# Altium integrated library Resistor.IntLib: 126 symbols (part 2 of 2)
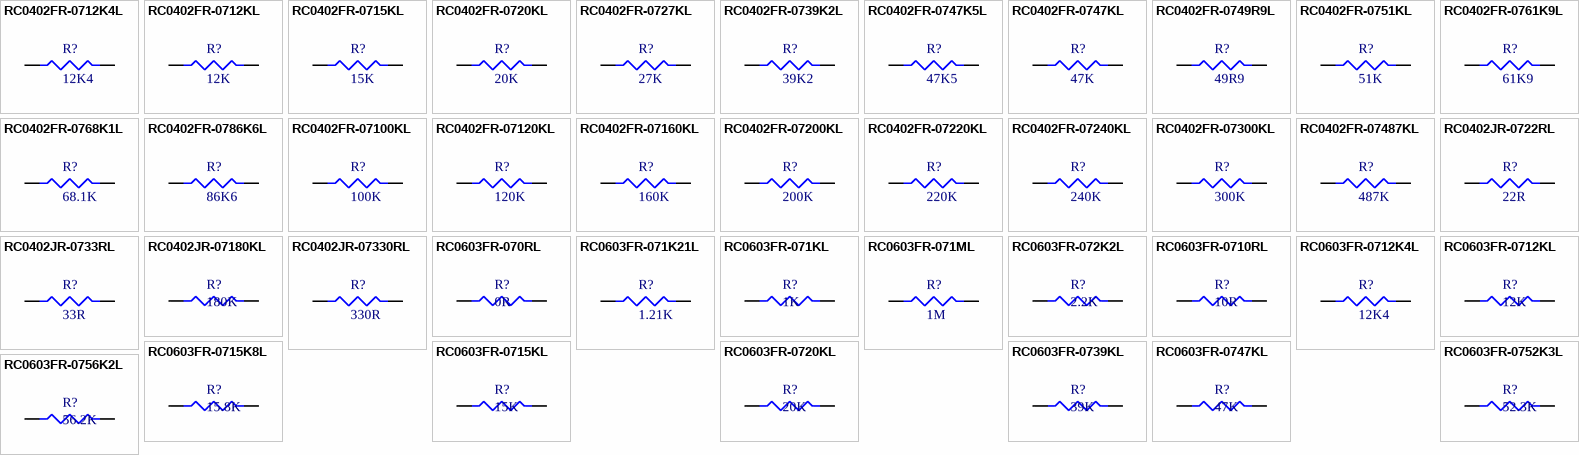
[diagram p4: symbols RC0402FR-0712K4L to RC0603FR-0756K2L]

## RC0603FR-0712K4L
designator R?, comment 12K4
12.4K, %1, 1/10W, 0603; Manufacturer: YAGEO; Manufacturer Part Number: RC0603FR-0712K4L; Value: 12400; Tolerance: 1%; Power Rating: 100mW; Voltage Rating: 50V; Temperature Coefficient: 100ppm/°C; Working Voltage: 75V; Purpose Of Usage: BASIC; Supplier 1: Digi-Key; RoHS: YES; Category: RESISTOR; Case/Package: 0603; Case Code (Imperial): 0603; Min Operating Temperature: -55°C; Max Operating Temperature: 155°C; Max Power Dissipation: 100mW; Voltage Rating (DC): 50V; Supplier Part Number 1: 311-12.4KHRTR-ND; Mount: SMD; Price 10K: 0.0025; Stock ID: ??; Sub-Category: CHIP RESISTOR; Local Supplier: GENERAL
footprint R0603 (Chip Resistor, 2-Leads, Body 1.60x0.80mm, IPC Medium Density)
pins: 1, 2

## RC0603FR-0712KL
designator R?, comment 12K
12K, %1, 1/10W, 0603; Manufacturer: YAGEO; Manufacturer Part Number: RC0603FR-0712KL; Value: 12000; Tolerance: 1%; Power Rating: 100mW; Voltage Rating (DC): 50V; Temperature Coefficient: 100ppm/°C; Purpose Of Usage: BASIC; Supplier 1: Digi-Key; Supplier Part Number 1: 311-12.0KHRCT-ND; RoHS: YES; Case/Package: 0603; Case Code (Imperial): 0603; Min Operating Temperature: -55°C; Max Operating Temperature: 155°C; Voltage Rating: 50V; Max Power Dissipation: 100mW; Category: RESISTOR; Sub-Category: CHIP RESISTOR; Stock ID: ??; Mount: SMD; Price 10K: 0.0025; Local Supplier: GENERAL
footprint R0603
pins: 1, 2

## RC0603FR-0715K8L
designator R?, comment 15.8K
15.8K ,%1 ,1/10 W ,0603; Manufacturer: YAGEO; Manufacturer Part Number: RC0603FR-0715K8L; Value: 15800; Tolerance: 1%; Voltage Rating (DC): 50V; Temperature Coefficient: 100ppm/°C; Power Rating: 100mW; Purpose Of Usage: BASIC; Supplier 1: Digi-Key; Supplier Part Number 1: 311-15.8KHRTR-ND; RoHS: YES; Case/Package: 0603; Case Code (Imperial): 0603; Min Operating Temperature: -55°C; Max Operating Temperature: 155°C; Voltage Rating: 50V; Category: RESISTOR; Supplier 2: JLCPCB; Sub-Category: CHIP RESISTOR; Stock ID: ??; Mount: SMD; Max Power Dissipation: 100mW; Price 10K: 0.0025; Local Supplier: GENERAL
footprint R0603
pins: 1, 2

## RC0603FR-0715KL
designator R?, comment 15K
15K, 1%, 1/10W, 0603; Manufacturer: YAGEO; Manufacturer Part Number: RC0603FR-0715KL; Value: 15000; Temperature Coefficient: 100ppm/°C; Voltage Rating (DC): 50V; Power Rating: 100mW; Purpose Of Usage: BASIC; Supplier 1: Digi-Key; Supplier Part Number 1: 311-15.0KHRDKR-ND; RoHS: YES; Case/Package: 0603; Case Code (Imperial): 0603; Min Operating Temperature: -55°C; Max Operating Temperature: 155°C; Tolerance: 1%; Voltage Rating: 50V; Max Power Dissipation: 100mW; Category: RESISTOR; Sub-Category: CHIP RESISTOR; Stock ID: ??; Mount: SMD; Price 10K: 0.0025; Local Supplier: GENERAL
footprint R0603
pins: 1, 2

## RC0603FR-0720KL
designator R?, comment 20K
20K, %1, 1/10W, 0603; Manufacturer: YAGEO; Manufacturer Part Number: RC0603FR-0720KL; Value: 20000; Tolerance: 1%; Temperature Coefficient: 100ppm/°C; Voltage Rating (DC): 50V; Power Rating: 100mW; Purpose Of Usage: BASIC; Supplier 1: Digi-Key; Supplier Part Number 1: 311-20.0KHRCT-ND; RoHS: YES; Case/Package: 0603; Case Code (Imperial): 0603; Min Operating Temperature: -55°C; Max Operating Temperature: 155°C; Voltage Rating: 50V; Max Power Dissipation: 100mW; Category: RESISTOR; Sub-Category: CHIP RESISTOR; Stock ID: ??; Mount: SMD; Price 10K: 0.0025; Local Supplier: GENERAL
footprint R0603
pins: 1, 2

## RC0603FR-0739KL
designator R?, comment 39K
39K, %1, 1/10W, 0603; Manufacturer: YAGEO; Manufacturer Part Number: RC0603FR-0739KL; Tolerance: 1%; Value: 39000; Power Rating: 100mW; Voltage Rating: 50V; Temperature Coefficient: 100ppm/°C; Purpose Of Usage: BASIC; Supplier 1: Digi-Key; Supplier Part Number 1: 311-39.0KHRCT-ND; RoHS: YES; Case/Package: 0603; Case Code (Imperial): 0603; Min Operating Temperature: -55°C; Max Operating Temperature: 155°C; Voltage Rating (DC): 50V; Category: RESISTOR; Sub-Category: CHIP RESISTOR; Stock ID: ??; Mount: SMD; Max Power Dissipation: 100mW; Price 10K: 0.0025; Local Supplier: GENERAL
footprint R0603
pins: 1, 2

## RC0603FR-0747KL
designator R?, comment 47K
47K, %1, 1/10W, 0603; Manufacturer: YAGEO; Manufacturer Part Number: RC0603FR-0747KL; Tolerance: 1%; Voltage Rating (DC): 50V; Value: 47000; Temperature Coefficient: 100ppm/°C; Power Rating: 100mW; Purpose Of Usage: BASIC; Supplier 1: Digi-Key; Supplier Part Number 1: 311-47.0KHRCT-ND; RoHS: YES; Case/Package: 0603; Case Code (Imperial): 0603; Min Operating Temperature: -55°C; Max Operating Temperature: 155°C; Voltage Rating: 50V; Max Power Dissipation: 100mW; Category: RESISTOR; Supplier 2: JLCPCB; Supplier Part Number 2: C25819; Sub-Category: CHIP RESISTOR; Stock ID: ??; Mount: SMD; Price 10K: 0.0025; Local Supplier: GENERAL
footprint R0603
pins: 1, 2

## RC0603FR-0752K3L
designator R?, comment 52.3K
52.3K ,%1 ,1/10 W ,0603; Manufacturer: YAGEO; Manufacturer Part Number: RC0603FR-0752K3L; Value: 52300; Power Rating: 100mW; Tolerance: 1%; Voltage Rating: 50V; Temperature Coefficient: 25ppm/°C; Working Voltage: 75V; Purpose Of Usage: BASIC; Supplier 1: Digi-Key; RoHS: YES; Case/Package: 0603; Case Code (Imperial): 0603; Min Operating Temperature: -55°C; Max Operating Temperature: 155°C; Max Power Dissipation: 100mW; Voltage Rating (DC): 50V; Category: RESISTOR; Supplier 2: JLCPCB; Supplier Part Number 2: C21189; Sub-Category: CHIP RESISTOR; Stock ID: ??; Mount: SMD; Price 10K: 0.0025; Local Supplier: GENERAL; Supplier Part Number 1: 311-52.3KHRTR-ND
footprint R0603
pins: 1, 2

## RC0603FR-0756K2L
designator R?, comment 56.2K
56.2 ,%1 ,1/10 W ,0603; Manufacturer: YAGEO; Manufacturer Part Number: RC0603FR-0756K2L; Value: 56200; Power Rating: 100mW; Tolerance: 1%; Voltage Rating: 50V; Temperature Coefficient: 200ppm/°C; Working Voltage: 75V; Purpose Of Usage: BASIC; Supplier 1: Digi-Key; Supplier Part Number 1: 311-56.2KHRTR-ND; RoHS: YES; Case/Package: 0603; Case Code (Imperial): 0603; Min Operating Temperature: -55°C; Max Operating Temperature: 155°C; Max Power Dissipation: 100mW; Voltage Rating (DC): 50V; Category: RESISTOR; Sub-Category: CHIP RESISTOR; Stock ID: ??; Mount: SMD; Price 10K: 0.0025; Local Supplier: GENERAL
footprint R0603
pins: 1, 2

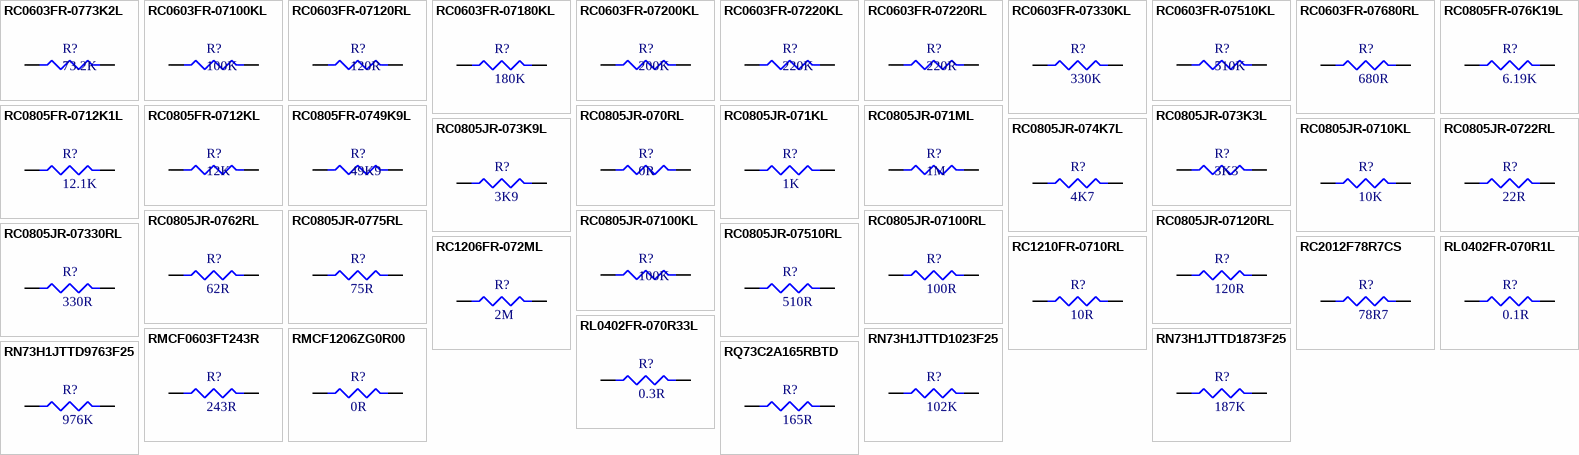
[diagram p2: symbols RC0603FR-0773K2L to RQ73C2A165RBTD]

## RC0603FR-0773K2L
designator R?, comment 73.2K
73.2K ,%1 ,1/10 W ,0603; Manufacturer: YAGEO; Manufacturer Part Number: RC0603FR-0773K2L; Value: 73200; Power Rating: 100mW; Tolerance: 1%; Voltage Rating: 50V; Temperature Coefficient: 200ppm/°C; Working Voltage: 75V; Purpose Of Usage: BASIC; Supplier 1: Digi-Key; Supplier Part Number 1: 311-73.2KHRTR-ND; RoHS: YES; Case/Package: 0603; Case Code (Imperial): 0603; Min Operating Temperature: -55°C; Max Operating Temperature: 155°C; Max Power Dissipation: 100mW; Voltage Rating (DC): 50V; Category: RESISTOR; Sub-Category: CHIP RESISTOR; Stock ID: ??; Mount: SMD; Price 10K: 0.0025; Local Supplier: GENERAL
footprint R0603
pins: 1, 2

## RC0603FR-07100KL
designator R?, comment 100K
100K, %1, 1/10W, 0603; Manufacturer: YAGEO; Manufacturer Part Number: RC0603FR-07100KL; Tolerance: 1%; Value: 100000; Temperature Coefficient: 100ppm/°C; Voltage Rating (DC): 50V; Power Rating: 100mW; Working Voltage: 75V; Purpose Of Usage: BASIC; Supplier 1: Digi-Key; Supplier Part Number 1: 311-100KHRCT-ND; RoHS: YES; Case/Package: 0603; Case Code (Imperial): 0603; Min Operating Temperature: -55°C; Max Operating Temperature: 155°C; Voltage Rating: 50V; Category: RESISTOR; Supplier 2: JLCPCB; Supplier Part Number 2: C25803; Sub-Category: CHIP RESISTOR; Stock ID: ??; Mount: SMD; Max Power Dissipation: 100mW; Price 10K: 0.0025; Local Supplier: GENERAL
footprint R0603
pins: 1, 2

## RC0603FR-07120RL
designator R?, comment 120R
120R ,%1 ,1/10 W ,0603; Manufacturer: YAGEO; Manufacturer Part Number: RC0603FR-07120RL; Value: 120; Tolerance: 1%; Voltage Rating (DC): 50V; Temperature Coefficient: 100ppm/°C; Power Rating: 100mW; Purpose Of Usage: BASIC; Supplier 1: Digi-Key; Supplier Part Number 1: 311-120HRCT-ND; RoHS: YES; Case/Package: 0603; Case Code (Imperial): 0603; Min Operating Temperature: -55°C; Max Operating Temperature: 155°C; Voltage Rating: 50V; Max Power Dissipation: 100mW; Category: RESISTOR; Sub-Category: CHIP RESISTOR; Stock ID: ??; Mount: SMD; Price 10K: 0.0025; Local Supplier: GENERAL
footprint R0603
pins: 1, 2

## RC0603FR-07180KL
designator R?, comment 180K
180K, %1, 1/10W, 0603; Manufacturer: YAGEO; Manufacturer Part Number: RC0603FR-07180KL; Voltage Rating (DC): 50V; Tolerance: 1%; Value: 180000; Power Rating: 100mW; Temperature Coefficient: 100ppm/°C; Working Voltage: 75V; Purpose Of Usage: BASIC; Supplier 1: Digi-Key; RoHS: YES; Case/Package: 0603; Case Code (Imperial): 0603; Min Operating Temperature: -55°C; Max Operating Temperature: 155°C; Voltage Rating: 50V; Max Power Dissipation: 100mW; Category: RESISTOR; Supplier Part Number 2: C22827; Supplier Part Number 1: 311-180KHRCT-ND; Supplier 2: JLCPCB; Sub-Category: CHIP RESISTOR; Stock ID: ??; Mount: SMD; Price 10K: 0.0025; Local Supplier: GENERAL
footprint R0603
pins: 1, 2

## RC0603FR-07200KL
designator R?, comment 200K
200K, %1, 1/10W, 0603; Manufacturer: YAGEO; Manufacturer Part Number: RC0603FR-07200KL; Value: 200000; Tolerance: 1%; Temperature Coefficient: 100ppm/°C; Voltage Rating (DC): 50V; Power Rating: 100mW; Purpose Of Usage: BASIC; Supplier 1: Digi-Key; Supplier Part Number 1: 311-200KHRCT-ND; RoHS: YES; Case/Package: 0603; Case Code (Imperial): 0603; Min Operating Temperature: -55°C; Max Operating Temperature: 155°C; Voltage Rating: 50V; Max Power Dissipation: 100mW; Category: RESISTOR; Sub-Category: CHIP RESISTOR; Stock ID: ??; Mount: SMD; Price 10K: 0.0025; Local Supplier: GENERAL
footprint R0603
pins: 1, 2

## RC0603FR-07220KL
designator R?, comment 220K
220K, %1, 1/10W, 0603; Manufacturer: YAGEO; Manufacturer Part Number: RC0603FR-07220KL; Tolerance: 1%; Power Rating: 100mW; Value: 220000; Temperature Coefficient: 100ppm/°C; Voltage Rating (DC): 50V; Purpose Of Usage: BASIC; Supplier 1: Digi-Key; Supplier Part Number 1: 311-220KHRCT-ND; RoHS: YES; Case/Package: 0603; Case Code (Imperial): 0603; Min Operating Temperature: -55°C; Max Operating Temperature: 155°C; Voltage Rating: 50V; Max Power Dissipation: 100mW; Category: RESISTOR; Sub-Category: CHIP RESISTOR; Stock ID: ??; Mount: SMD; Price 10K: 0.0025; Local Supplier: GENERAL
footprint R0603
pins: 1, 2

## RC0603FR-07220RL
designator R?, comment 220R
220R, %1, 1/10W, 0603; Manufacturer: YAGEO; Manufacturer Part Number: RC0603FR-07220RL; Value: 220; Tolerance: 1%; Voltage Rating (DC): 50V; Temperature Coefficient: 100ppm/°C; Power Rating: 100mW; Purpose Of Usage: BASIC; Supplier 1: Digi-Key; Supplier Part Number 1: 311-220HRCT-ND; RoHS: YES; Case/Package: 0603; Case Code (Imperial): 0603; Min Operating Temperature: -55°C; Max Operating Temperature: 155°C; Voltage Rating: 50V; Max Power Dissipation: 100mW; Category: RESISTOR; Sub-Category: CHIP RESISTOR; Stock ID: ??; Mount: SMD; Price 10K: 0.0025; Local Supplier: GENERAL
footprint R0603
pins: 1, 2

## RC0603FR-07330KL
designator R?, comment 330K
330K, %1, 1/10W, 0603; Manufacturer: YAGEO; Manufacturer Part Number: RC0603FR-07330KL; Tolerance: 1%; Power Rating: 100mW; Value: 330000; Voltage Rating (DC): 50V; Temperature Coefficient: 100ppm/°C; Voltage Rating: 75V; Purpose Of Usage: BASIC; Supplier 1: Digi-Key; RoHS: YES; Case/Package: 0603; Case Code (Imperial): 0603; Min Operating Temperature: -55°C; Max Operating Temperature: 155°C; Max Power Dissipation: 100mW; Category: RESISTOR; Supplier Part Number 1: 311-330KHRCT-ND; Sub-Category: CHIP RESISTOR; Stock ID: ??; Mount: SMD; Price 10K: 0.0025; Local Supplier: GENERAL
footprint R0603
pins: 1, 2

## RC0603FR-07510KL
designator R?, comment 510K
510K, %1, 1/10W, 0603; Manufacturer: YAGEO; Manufacturer Part Number: RC0603FR-07510KL; Tolerance: 1%; Power Rating: 100mW; Value: 510000; Voltage Rating: 50V; Temperature Coefficient: 100ppm/°C; Purpose Of Usage: BASIC; Supplier 1: Digi-Key; Supplier Part Number 1: 311-510KHRCT-ND; RoHS: YES; Case/Package: 0603; Case Code (Imperial): 0603; Min Operating Temperature: -55°C; Max Operating Temperature: 155°C; Max Power Dissipation: 100mW; Voltage Rating (DC): 50V; Category: RESISTOR; Sub-Category: CHIP RESISTOR; Stock ID: ??; Mount: SMD; Price 10K: 0.0025; Local Supplier: GENERAL
footprint R0603
pins: 1, 2

## RC0603FR-07680RL
designator R?, comment 680R
680R, %1, 1/10W, 0603; Manufacturer: YAGEO; Manufacturer Part Number: RC0603FR-07680RL; Description: 100mW Thick Film Resistors 75V ±100ppm/℃ ±1% 680Ω 0603 Chip Resistor - Surface Mount ROHS; Max Power Dissipation: 100mW; Value: 680; Temperature Coefficient: 100ppm/°C; Tolerance: 1%; Voltage Rating: 75V; Voltage Rating (DC): 50V; Purpose Of Usage: BASIC; RoHS: Compliant; Category: RESISTOR; Case/Package: 0603; Case Code (Imperial): 0603; Max Operating Temperature: 155°C; Min Operating Temperature: -55°C; Power Rating: 100mW; Working Voltage: 75V; Local Supplier: GENERAL; Mount: SMD; Price 10K: 0.0025; Stock ID: ??; Sub-Category: CHIP RESISTOR; Supplier 1: Digi-Key; Supplier Part Number 1: 311-680HRTR-ND
footprint R0603 (Chip Resistor, 2-Leads, Body 1.60x0.80mm, IPC Medium Density)
pins: 1, 2

## RC0805FR-076K19L
designator R?, comment 6.19K
6.19K, %1, 1/10W, 0805; Manufacturer: YAGEO; Manufacturer Part Number: RC0805FR-076K19L; Tolerance: 1%; Value: 6190; Power Rating: 125mW; Voltage Rating: 150V; Temperature Coefficient: 100ppm/°C; Purpose Of Usage: BASIC; Supplier 1: Digi-Key; Supplier Part Number 1: 311-6.19KCRCT-ND; RoHS: YES; Case/Package: 0805; Case Code (Imperial): 0805; Min Operating Temperature: -55°C; Max Operating Temperature: 155°C; Voltage Rating (DC): 150V; Max Power Dissipation: 125mW; Category: RESISTOR; Sub-Category: CHIP RESISTOR; Stock ID: ??; Mount: SMD; Price 10K: 0.0025; Local Supplier: GENERAL
footprint R0805
pins: 1, 2

## RC0805FR-0712K1L
designator R?, comment 12.1K
12.1K, %1, 1/10W, 0805; Manufacturer: YAGEO; Manufacturer Part Number: RC0805FR-0712K1L; Value: 12100; Power Rating: 125mW; Tolerance: 1%; Temperature Coefficient: 100ppm/°C; Voltage Rating (DC): 150V; Purpose Of Usage: BASIC; Supplier 1: Digi-Key; Supplier Part Number 1: 311-12.1KCRCT-ND; RoHS: YES; Case/Package: 0805; Case Code (Imperial): 0805; Min Operating Temperature: -55°C; Max Operating Temperature: 155°C; Voltage Rating: 150V; Max Power Dissipation: 125mW; Category: RESISTOR; Sub-Category: CHIP RESISTOR; Stock ID: ??; Mount: SMD; Price 10K: 0.0025; Local Supplier: GENERAL
footprint R0805
pins: 1, 2

## RC0805FR-0712KL
designator R?, comment 12K
12K, %1, 1/10W, 0805; Manufacturer: YAGEO; Manufacturer Part Number: RC0805FR-0712KL; Tolerance: 1%; Power Rating: 125mW; Temperature Coefficient: 100ppm/°C; Value: 12000; Voltage Rating (DC): 150V; Purpose Of Usage: BASIC; Supplier 1: Digi-Key; RoHS: YES; Mount: SMD; Case/Package: 0805; Min Operating Temperature: -55°C; Max Operating Temperature: 155°C; Supplier Part Number 1: 311-12.0KCRDKR-ND; Category: RESISTOR; Sub-Category: CHIP RESISTOR; Case Code (Imperial): 0805; Stock ID: ??; Max Power Dissipation: 125mW; Price 10K: 0.0025; Local Supplier: GENERAL
footprint R0805
pins: 1, 2

## RC0805FR-0749K9L
designator R?, comment 49K9
49.9K, %1, 1/8W, 0805; Manufacturer: YAGEO; Manufacturer Part Number: RC0805FR-0749K9L; Voltage Rating (DC): 150V; Temperature Coefficient: 100ppm/°C; Value: 49900; Power Rating: 125mW; Tolerance: 1%; Purpose Of Usage: BASIC; Supplier 1: Digi-Key; RoHS: YES; Mount: SMD; Case/Package: 0805; Case Code (Imperial): 0805; Min Operating Temperature: -55°C; Max Operating Temperature: 155°C; Voltage Rating: 150V; Max Power Dissipation: 125mW; Working Voltage: 150V; Category: RESISTOR; Supplier Part Number 1: 311-49.9KCRCT-ND; Sub-Category: CHIP RESISTOR; Stock ID: ??; Price 10K: 0.0025; Local Supplier: GENERAL
footprint R0805
pins: 1, 2

## RC0805JR-070RL
designator R?, comment 0R
0R, %5, 1/8W, 0805; Manufacturer: YAGEO; Manufacturer Part Number: RC0805JR-070RL; Value: 0; Tolerance: 5%; Voltage Rating: 150V; Power Rating: 125mW; Temperature Coefficient: 200ppm/°C; Purpose Of Usage: BASIC; Supplier 1: Digi-Key; RoHS: YES; Case/Package: 0805; Case Code (Imperial): 0805; Min Operating Temperature: -55°C; Max Operating Temperature: 155°C; Voltage Rating (DC): 150V; Supplier Part Number 1: 311-0.0ARCT-ND; Category: RESISTOR; Sub-Category: CHIP RESISTOR; Stock ID: ??; Mount: SMD; Max Power Dissipation: 125mW; Price 10K: 0.0025; Local Supplier: GENERAL
footprint R0805
pins: 1, 2

## RC0805JR-071KL
designator R?, comment 1K
1K, %5, 1/8W, 0805; Manufacturer: YAGEO; Manufacturer Part Number: RC0805JR-071KL; Value: 1000; Tolerance: 5%; Power Rating: 125mW; Voltage Rating: 150V; Temperature Coefficient: 100ppm/°C; Purpose Of Usage: BASIC; Supplier 1: Digi-Key; Supplier Part Number 1: 311-1.0KARCT-ND; RoHS: YES; Case/Package: 0805; Case Code (Imperial): 0805; Min Operating Temperature: -55°C; Max Operating Temperature: 155°C; Category: RESISTOR; Sub-Category: CHIP RESISTOR; Stock ID: ??; Mount: SMD; Max Power Dissipation: 125mW; Price 10K: 0.0025; Local Supplier: GENERAL
footprint R0805
pins: 1, 2

## RC0805JR-071ML
designator R?, comment 1M
1M, %5, 1/8W, 0805; Manufacturer: YAGEO; Manufacturer Part Number: RC0805JR-071ML; Value: 1000000; Power Rating: 125mW; Tolerance: 5%; Voltage Rating: 150V; Temperature Coefficient: 100ppm/°C; Purpose Of Usage: BASIC; Supplier 1: Digi-Key; RoHS: YES; Case/Package: 0805; Case Code (Imperial): 0805; Min Operating Temperature: -55°C; Max Operating Temperature: 155°C; Max Power Dissipation: 125mW; Supplier Part Number 1: 311-1.0MARCT-ND; Category: RESISTOR; Sub-Category: CHIP RESISTOR; Stock ID: ??; Mount: SMD; Price 10K: 0.0025; Local Supplier: GENERAL
footprint R0805
pins: 1, 2

## RC0805JR-073K3L
designator R?, comment 3K3
3.3K, %5, 1/8W, 0805; Manufacturer: YAGEO; Manufacturer Part Number: RC0805JR-073K3L; Value: 3300; Tolerance: 5%; Power Rating: 125mW; Voltage Rating: 150V; Temperature Coefficient: 100ppm/°C; Purpose Of Usage: BASIC; Supplier 1: Digi-Key; RoHS: YES; Case/Package: 0805; Case Code (Imperial): 0805; Min Operating Temperature: -55°C; Max Operating Temperature: 155°C; Supplier Part Number 1: 311-3.3KARCT-ND; Category: RESISTOR; Sub-Category: CHIP RESISTOR; Stock ID: ??; Mount: SMD; Max Power Dissipation: 125mW; Price 10K: 0.0025; Local Supplier: GENERAL
footprint R0805
pins: 1, 2

## RC0805JR-073K9L
designator R?, comment 3K9
3.9K, %5, 1/8W, 0805; Manufacturer: YAGEO; Manufacturer Part Number: RC0805JR-073K9L; Value: 3900; Tolerance: 5%; Power Rating: 125mW; Voltage Rating: 150V; Temperature Coefficient: 100ppm/°C; Purpose Of Usage: BASIC; Supplier 1: Digi-Key; Supplier Part Number 1: 311-3.9KARCT-ND; RoHS: YES; Case/Package: 0805; Case Code (Imperial): 0805; Min Operating Temperature: -55°C; Max Operating Temperature: 155°C; Max Power Dissipation: 125mW; Category: RESISTOR; Sub-Category: CHIP RESISTOR; Stock ID: ??; Mount: SMD; Price 10K: 0.0025; Local Supplier: GENERAL
footprint R0805
pins: 1, 2

## RC0805JR-074K7L
designator R?, comment 4K7
4.7K, %5, 1/8W, 0805; Manufacturer: YAGEO; Manufacturer Part Number: RC0805JR-074K7L; Value: 4700; Tolerance: 5%; Temperature Coefficient: 100ppm/°C; Power Rating: 125mW; Voltage Rating: 150V; Purpose Of Usage: BASIC; Supplier 1: Digi-Key; Supplier Part Number 1: 311-4.7KARDKR-ND; RoHS: YES; Case/Package: 0805; Case Code (Imperial): 0805; Min Operating Temperature: -55°C; Max Operating Temperature: 155°C; Category: RESISTOR; Sub-Category: CHIP RESISTOR; Stock ID: ??; Mount: SMD; Max Power Dissipation: 125mW; Price 10K: 0.0025; Local Supplier: GENERAL
footprint R0805
pins: 1, 2

## RC0805JR-0710KL
designator R?, comment 10K
10K, %5, 1/8W, 0805; Manufacturer: YAGEO; Manufacturer Part Number: RC0805JR-0710KL; Tolerance: 5%; Value: 10000; Power Rating: 125mW; Voltage Rating: 150V; Temperature Coefficient: 100ppm/°C; Purpose Of Usage: BASIC; Supplier 1: Digi-Key; Supplier Part Number 1: 311-10KARCT-ND; RoHS: YES; Case/Package: 0805; Case Code (Imperial): 0805; Min Operating Temperature: -55°C; Max Operating Temperature: 155°C; Category: RESISTOR; Sub-Category: CHIP RESISTOR; Stock ID: ??; Mount: SMD; Max Power Dissipation: 125mW; Price 10K: 0.0025; Local Supplier: GENERAL
footprint R0805
pins: 1, 2

## RC0805JR-0722RL
designator R?, comment 22R
22R, %5, 1/8W, 0805; Manufacturer: YAGEO; Manufacturer Part Number: RC0805JR-0722RL; Tolerance: 5%; Value: 22; Power Rating: 125mW; Voltage Rating: 150V; Temperature Coefficient: 100ppm/°C; Purpose Of Usage: BASIC; Supplier 1: Digi-Key; Supplier Part Number 1: 311-22ARCT-ND; RoHS: YES; Case/Package: 0805; Case Code (Imperial): 0805; Min Operating Temperature: -55°C; Max Operating Temperature: 155°C; Category: RESISTOR; Sub-Category: CHIP RESISTOR; Stock ID: ??; Mount: SMD; Max Power Dissipation: 125mW; Price 10K: 0.0025; Local Supplier: GENERAL
footprint R0805
pins: 1, 2

## RC0805JR-0762RL
designator R?, comment 62R
62R, %5, 1/8W, 0805; Manufacturer: YAGEO; Manufacturer Part Number: RC0805JR-0762RL; Max Power Dissipation: 125mW; Purpose Of Usage: BASIC; Temperature Coefficient: 100ppm/°C; Tolerance: 5%; Value: 62; Voltage Rating: 150V; RoHS: YES; Category: RESISTOR; Case/Package: 0805; Case Code (Imperial): 0805; Local Supplier: GENERAL; Max Operating Temperature: 155°C; Min Operating Temperature: -55°C; Mount: SMD; Power Rating: 125mW; Price 10K: 0.0025; Stock ID: ??; Sub-Category: CHIP RESISTOR; Supplier 1: Digi-Key; Supplier Part Number 1: 311-62ARCT-ND
footprint R0805 (Chip Resistor, 2-Leads, Body 2.00x1.25mm, IPC Medium Density)
pins: 1, 2

## RC0805JR-0775RL
designator R?, comment 75R
75R, %5, 1/8W, 0805; Manufacturer: YAGEO; Manufacturer Part Number: RC0805JR-0775RL; Value: 75; Tolerance: 5%; Power Rating: 125mW; Voltage Rating: 150V; Temperature Coefficient: 100ppm/°C; Purpose Of Usage: BASIC; Supplier 1: Digi-Key; Supplier Part Number 1: 311-75ARCT-ND; RoHS: YES; Case/Package: 0805; Case Code (Imperial): 0805; Min Operating Temperature: -55°C; Max Operating Temperature: 155°C; Voltage Rating (DC): 150V; Category: RESISTOR; Sub-Category: CHIP RESISTOR; Stock ID: ??; Mount: SMD; Max Power Dissipation: 125mW; Price 10K: 0.0025; Local Supplier: GENERAL
footprint R0805
pins: 1, 2

## RC0805JR-07100KL
designator R?, comment 100K
100K, %5, 1/8W, 0805; Manufacturer: YAGEO; Manufacturer Part Number: RC0805JR-07100KL; Value: 100000; Tolerance: 5%; Temperature Coefficient: 100ppm/°C; Power Rating: 125mW; Voltage Rating: 150V; Purpose Of Usage: BASIC; Supplier 1: Digi-Key; RoHS: YES; Case/Package: 0805; Case Code (Imperial): 0805; Min Operating Temperature: -55°C; Max Operating Temperature: 155°C; Category: RESISTOR; Supplier Part Number 1: 311-100KARCT-ND; Sub-Category: CHIP RESISTOR; Stock ID: ??; Mount: SMD; Max Power Dissipation: 125mW; Price 10K: 0.0025; Local Supplier: GENERAL
footprint R0805
pins: 1, 2

## RC0805JR-07100RL
designator R?, comment 100R
100R, %5, 1/8W, 0805; Manufacturer: YAGEO; Manufacturer Part Number: RC0805JR-07100RL; Tolerance: 5%; Value: 100; Power Rating: 125mW; Voltage Rating: 150V; Temperature Coefficient: 100ppm/°C; Purpose Of Usage: BASIC; Supplier 1: Digi-Key; Supplier Part Number 1: 311-100ARCT-ND; RoHS: YES; Case/Package: 0805; Case Code (Imperial): 0805; Min Operating Temperature: -55°C; Max Operating Temperature: 155°C; Category: RESISTOR; Sub-Category: CHIP RESISTOR; Stock ID: ??; Mount: SMD; Max Power Dissipation: 125mW; Price 10K: 0.0025; Local Supplier: GENERAL
footprint R0805
pins: 1, 2

## RC0805JR-07120RL
designator R?, comment 120R
120R, %5, 1/8W, 0805; Manufacturer: YAGEO; Manufacturer Part Number: RC0805JR-07120RL; Value: 120; Power Rating: 125mW; Tolerance: 5%; Voltage Rating: 150V; Temperature Coefficient: 100ppm/°C; Purpose Of Usage: BASIC; Supplier 1: Digi-Key; Supplier Part Number 1: 311-120ARCT-ND; RoHS: YES; Case/Package: 0805; Case Code (Imperial): 0805; Min Operating Temperature: -55°C; Max Operating Temperature: 155°C; Max Power Dissipation: 125mW; Category: RESISTOR; Sub-Category: CHIP RESISTOR; Stock ID: ??; Mount: SMD; Price 10K: 0.0025; Local Supplier: GENERAL
footprint R0805
pins: 1, 2

## RC0805JR-07330RL
designator R?, comment 330R
330R, %5, 1/8W, 0805; Manufacturer: YAGEO; Manufacturer Part Number: RC0805JR-07330RL; Tolerance: 5%; Value: 330; Power Rating: 125mW; Voltage Rating: 150V; Temperature Coefficient: 100ppm/°C; Purpose Of Usage: BASIC; Supplier 1: Digi-Key; Supplier Part Number 1: 311-330ARCT-ND; RoHS: YES; Case/Package: 0805; Case Code (Imperial): 0805; Min Operating Temperature: -55°C; Max Operating Temperature: 155°C; Category: RESISTOR; Sub-Category: CHIP RESISTOR; Stock ID: ??; Mount: SMD; Max Power Dissipation: 125mW; Price 10K: 0.0025; Local Supplier: GENERAL
footprint R0805
pins: 1, 2

## RC0805JR-07510RL
designator R?, comment 510R
510R, %5, 1/8W, 0805; Manufacturer: YAGEO; Manufacturer Part Number: RC0805JR-07510RL; Value: 510; Tolerance: 5%; Power Rating: 125mW; Voltage Rating: 150V; Temperature Coefficient: 100ppm/°C; Voltage Rating (DC): 300V; Purpose Of Usage: BASIC; Supplier 1: Digi-Key; Supplier Part Number 1: 311-510ARCT-ND; RoHS: YES; Case/Package: 0805; Case Code (Imperial): 0805; Min Operating Temperature: -55°C; Max Operating Temperature: 155°C; Max Power Dissipation: 125mW; Working Voltage: 150V; Category: RESISTOR; Sub-Category: CHIP RESISTOR; Stock ID: ??; Mount: SMD; Price 10K: 0.0025; Local Supplier: GENERAL
footprint R0805
pins: 1, 2

## RC1206FR-072ML
designator R?, comment 2M
2M, %1, 1/4W, 1206; Manufacturer: YAGEO; Manufacturer Part Number: RC1206FR-072ML; Value: 2000000; Tolerance: 1%; Power Rating: 250mW; Voltage Rating: 200V; Temperature Coefficient: 100ppm/°C; Purpose Of Usage: BASIC; Supplier 1: Digi-Key; Supplier Part Number 1: 311-2.00MFRCT-ND; RoHS: YES; Mount: SMD; Case/Package: 1206; Case Code (Imperial): 1206; Min Operating Temperature: -55°C; Max Operating Temperature: 155°C; Max Power Dissipation: 250mW; Voltage Rating (DC): 200V; Category: RESISTOR; Sub-Category: CHIP RESISTOR; Stock ID: ??; Price 10K: 0.0025; Local Supplier: GENERAL
footprint R1206
pins: 1, 2

## RC1210FR-0710RL
designator R?, comment 10R
Res Thick Film 1210 10 Ohm 1% 1/2W ±200ppm/°C Molded SMD SMD Paper T/R; Manufacturer: YAGEO; Manufacturer Part Number: RC1210FR-0710RL; Max Power Dissipation: 500mW; Purpose Of Usage: BASIC; Value: 10; RoHS: YES; Category: RESISTOR; Case/Package: 1210; Case Code (Imperial): 1210; Local Supplier: GENERAL; Max Operating Temperature: 155°C; Min Operating Temperature: -55°C; Mount: SMD; Power Rating: 500mW; Stock ID: ??; Sub-Category: CHIP RESISTOR; Supplier 1: Digi-Key; Supplier Part Number 1: 13-RC1210FR-0710RLTR-ND; Temperature Coefficient: 200ppm/°C; Tolerance: 1%
footprint R1210
pins: 1, 2

## RC2012F78R7CS
designator R?, comment 78R7
78.7R, %1, 1/8W, 0805; Manufacturer: SAMSUNG; Manufacturer Part Number: RC2012F78R7CS; Value: 78.7; Tolerance: 1%; Power Rating: 125mW; Temperature Coefficient: 100ppm/°C; Voltage Rating (DC): 150V; Purpose Of Usage: BASIC; Supplier 1: Digi-Key; Supplier Part Number 1: 1276-5218-1-ND; RoHS: YES; Case/Package: 0805; Case Code (Imperial): 0805; Min Operating Temperature: -55°C; Max Operating Temperature: 155°C; Max Power Dissipation: 125mW; Category: RESISTOR; Sub-Category: CHIP RESISTOR; Stock ID: ??; Mount: SMD; Price 10K: 0.0025; Local Supplier: GENERAL
footprint R0805
pins: 1, 2

## RL0402FR-070R1L
designator R?, comment 0.1R
0.1R, %1, 1/16W, 0402; Manufacturer: YAGEO; Manufacturer Part Number: RL0402FR-070R1L; Value: 0.1; Tolerance: 1%; Power Rating: 63mW; Voltage Rating: 100V; Temperature Coefficient: 800ppm/°C; Purpose Of Usage: BASIC; Supplier 1: Digi-Key; RoHS: YES; Category: RESISTOR; Case/Package: 0402; Case Code (Imperial): 0402; Min Operating Temperature: -55°C; Max Operating Temperature: 125°C; Max Power Dissipation: 63mW; Supplier Part Number 1: 311-.10PCT-ND; Local Supplier: GENERAL; Mount: SMD; Price 10K: 0.0025; Stock ID: ??; Sub-Category: CHIP RESISTOR
footprint R0402 (Chip Resistor, 2-Leads, Body 1.00x0.50mm, IPC Medium Density)
pins: 1, 2

## RL0402FR-070R33L
designator R?, comment 0.3R
0.33R, %1, 1/16W, 0402; Manufacturer: YAGEO; Manufacturer Part Number: RL0402FR-070R33L; Voltage Rating (DC): 100V; Value: 0.33; Power Rating: 63mW; Tolerance: 1%; Temperature Coefficient: 800ppm/°C; Purpose Of Usage: BASIC; Supplier 1: Digi-Key; RoHS: YES; Category: RESISTOR; Case/Package: 0402; Case Code (Imperial): 0402; Min Operating Temperature: -55°C; Max Operating Temperature: 125°C; Voltage Rating: 100V; Max Power Dissipation: 63mW; Supplier Part Number 1: 311-.33PTR-ND; Mount: SMD; Price 10K: 0.044; Stock ID: ??; Sub-Category: CHIP RESISTOR; Local Supplier: GENERAL
footprint R0402 (Chip Resistor, 2-Leads, Body 1.00x0.50mm, IPC Medium Density)
pins: 1, 2

## RMCF0603FT243R
designator R?, comment 243R
243R, %1, 1/10W, 0603; Manufacturer: YAGEO; Manufacturer Part Number: RMCF0603FT243R; Max Power Dissipation: 100mW; Purpose Of Usage: BASIC; Temperature Coefficient: 100ppm/°C; Tolerance: 1%; Value: 243; RoHS: YES; Category: RESISTOR; Case/Package: 0603; Case Code (Imperial): 0603; Local Supplier: GENERAL; Max Operating Temperature: 155°C; Min Operating Temperature: -55°C; Mount: SMD; Power Rating: 100mW; Stock ID: ??; Sub-Category: CHIP RESISTOR; Supplier 1: Digi-Key; Supplier Part Number 1: RMCF0603FT243RTR-ND
footprint R0603 (Chip Resistor, 2-Leads, Body 1.60x0.80mm, IPC Medium Density)
pins: 1, 2

## RMCF1206ZG0R00
designator R?, comment 0R
0R, %5, 1/4W, 1206; Manufacturer: STACKPOLE; Manufacturer Part Number: RMCF1206ZG0R00; Value: 0; Max Power Dissipation: 250mW; Purpose Of Usage: BASIC; Supplier 1: Digi-Key; Supplier Part Number 1: RMCF1206ZG0R00CT-ND; RoHS: YES; Mount: SMD; Case/Package: 1206; Case Code (Imperial): 1206; Min Operating Temperature: -55°C; Max Operating Temperature: 155°C; Category: RESISTOR; Sub-Category: CHIP RESISTOR; Stock ID: ??; Power Rating: 250mW; Price 10K: 0.0025; Local Supplier: GENERAL
footprint R1206
pins: 1, 2

## RN73H1JTTD1023F25
designator R?, comment 102K
102K, %5, 1/10W, 0603; Manufacturer: KOA Speer; Manufacturer Part Number: RN73H1JTTD1023F25; Power Rating: 100mW; Value: 102000; Temperature Coefficient: 25ppm/°C; Tolerance: 1%; Voltage Rating: 75V; Purpose Of Usage: BASIC; RoHS: YES; Category: RESISTOR; Case/Package: 0603; Case Code (Imperial): 0603; Max Operating Temperature: 155°C; Min Operating Temperature: -55°C; Voltage Rating (DC): 75V; Working Voltage: 75V; Local Supplier: GENERAL; Max Power Dissipation: 100mW; Mount: SMD; Stock ID: ??; Sub-Category: CHIP RESISTOR; Supplier 1: Digi-Key; Price 10K: 0.0025; Supplier Part Number 1: 2019-RN73H1JTTD1023F25TR-ND
footprint R0603 (Chip Resistor, 2-Leads, Body 1.60x0.80mm, IPC Medium Density)
pins: 1, 2

## RN73H1JTTD1873F25
designator R?, comment 187K
187K, %5, 1/10W, 0603; Manufacturer: KOA Speer; Manufacturer Part Number: RN73H1JTTD1873F25; Power Rating: 100mW; Value: 187000; Temperature Coefficient: 25ppm/°C; Tolerance: 1%; Voltage Rating: 75V; Purpose Of Usage: BASIC; RoHS: YES; Category: RESISTOR; Case/Package: 0603; Case Code (Imperial): 0603; Max Operating Temperature: 155°C; Min Operating Temperature: -55°C; Voltage Rating (DC): 75V; Working Voltage: 75V; Local Supplier: GENERAL; Max Power Dissipation: 100mW; Mount: SMD; Stock ID: ??; Sub-Category: CHIP RESISTOR; Supplier 1: Digi-Key; Supplier Part Number 1: 2019-RN73H1JTTD1873F25TR-ND
footprint R0603 (Chip Resistor, 2-Leads, Body 1.60x0.80mm, IPC Medium Density)
pins: 1, 2

## RN73H1JTTD9763F25
designator R?, comment 976K
976K, %5, 1/10W, 0603; Manufacturer: KOA Speer; Manufacturer Part Number: RN73H1JTTD9763F25; Value: 976000; Temperature Coefficient: 25ppm/°C; Tolerance: 1%; Working Voltage: 75V; Max Power Dissipation: 100mW; Purpose Of Usage: BASIC; Voltage Rating (DC): 50V; RoHS: YES; Category: RESISTOR; Max Operating Temperature: 155°C; Min Operating Temperature: -55°C; Case/Package: 0603; Case Code (Imperial): 0603; Local Supplier: GENERAL; Mount: SMD; Power Rating: 100mW; Price 10K: 0.0025; Stock ID: ??; Sub-Category: CHIP RESISTOR; Supplier 1: Digi-Key; Supplier Part Number 1: 2019-RN73H1JTTD9763F25TR-ND; Voltage Rating: 50V
footprint R0603 (Chip Resistor, 2-Leads, Body 1.60x0.80mm, IPC Medium Density)
pins: 1, 2

## RQ73C2A165RBTD
designator R?, comment 165R
165R, %0.1, 1/4W, 0805; Manufacturer: TE Connectivity AMP; Manufacturer Part Number: 1-2176379-9; Power Rating: 200mW; Value: 165; Temperature Coefficient: 10ppm/°C; Tolerance: 0.1%; Voltage Rating: 100V; Purpose Of Usage: BASIC; RoHS: YES; Category: RESISTOR; Case/Package: 0805; Min Operating Temperature: -55°C; Max Operating Temperature: 155°C; Case Code (Imperial): 0805; Max Power Dissipation: 200mW; Mount: SMD; Price 10K: 0.54; Stock ID: ??; Sub-Category: CHIP RESISTOR; Supplier 1: Digi-Key; Supplier Part Number 1: A139521TR-ND; Voltage Rating (DC): 100V
footprint R0805 (Chip Resistor, 2-Leads, Body 2.00x1.25mm, IPC Medium Density)
pins: 1, 2

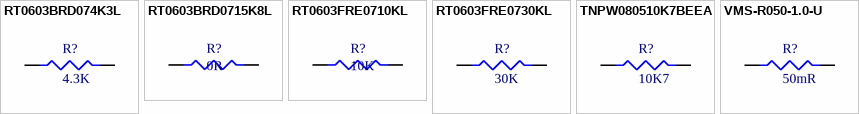
[diagram p3: symbols RT0603BRD074K3L to VMS-R050-1.0-U]

## RT0603BRD074K3L
designator R?, comment 4.3K
4.3K, %0.1, 1/10W, 0603; Manufacturer: YAGEO; Manufacturer Part Number: RT0603BRD074K3L; Max Power Dissipation: 100mW; Value: 4300; Temperature Coefficient: 25ppm/°C; Tolerance: 0.1%; Voltage Rating: 75V; Voltage Rating (DC): 50V; Purpose Of Usage: BASIC; RoHS: YES; Category: RESISTOR; Case/Package: 0603; Case Code (Imperial): 0603; Max Operating Temperature: 155°C; Min Operating Temperature: -55°C; Power Rating: 100mW; Working Voltage: 75V; Local Supplier: GENERAL; Mount: SMD; Price 10K: 0.0025; Stock ID: ??; Sub-Category: CHIP RESISTOR; Supplier 1: Digi-Key; Supplier Part Number 1: YAG4568CT-ND
footprint R0603 (Chip Resistor, 2-Leads, Body 1.60x0.80mm, IPC Medium Density)
pins: 1, 2

## RT0603BRD0715K8L
designator R?, comment 0R
0R ,%1 ,1/10 W ,0603; Manufacturer: YAGEO; Manufacturer Part Number: RC0603FR-070RL; Value: 0; Power Rating: 100mW; Tolerance: 1%; Voltage Rating: 50V; Temperature Coefficient: 200ppm/°C; Working Voltage: 75V; Purpose Of Usage: BASIC; Supplier 1: Digi-Key; Supplier Part Number 1: 311-0.0HRCT-ND; RoHS: YES; Case/Package: 0603; Case Code (Imperial): 0603; Min Operating Temperature: -55°C; Max Operating Temperature: 155°C; Max Power Dissipation: 100mW; Voltage Rating (DC): 50V; Category: RESISTOR; Supplier 2: JLCPCB; Supplier Part Number 2: C21189; Sub-Category: CHIP RESISTOR; Stock ID: ??; Mount: SMD; Price 10K: 0.0025; Local Supplier: GENERAL
footprint R0603
pins: 1, 2

## RT0603FRE0710KL
designator R?, comment 10K
10K, %1, 1/10W, 0603; Manufacturer: YAGEO; Manufacturer Part Number: RT0603FRE0710KL; Value: 10000; Tolerance: 1%; Power Rating: 100mW; Voltage Rating: 75V; Temperature Coefficient: 50ppm/°C; Purpose Of Usage: BASIC; Supplier 1: Digi-Key; Supplier Part Number 1: YAG2321CT-ND; RoHS: YES; Case/Package: 0603; Case Code (Imperial): 0603; Min Operating Temperature: -55°C; Max Operating Temperature: 125°C; Max Power Dissipation: 100mW; Voltage Rating (DC): 75V; Category: RESISTOR; Supplier 2: JLCPCB; Supplier Part Number 2: C25804; Sub-Category: CHIP RESISTOR; Stock ID: ??; Mount: SMD; Price 10K: 0.0025; Local Supplier: GENERAL
footprint R0603
pins: 1, 2

## RT0603FRE0730KL
designator R?, comment 30K
30K, %1, 1/10W, 0603; Manufacturer: YAGEO; Manufacturer Part Number: RT0603FRE0730KL; Value: 30000; Tolerance: 1%; Power Rating: 100mW; Voltage Rating: 75V; Temperature Coefficient: 50ppm/°C; Voltage Rating (DC): 50V; Purpose Of Usage: BASIC; Supplier 1: Digi-Key; RoHS: YES; Case/Package: 0603; Case Code (Imperial): 0603; Min Operating Temperature: -55°C; Max Operating Temperature: 125°C; Max Power Dissipation: 100mW; Supplier Part Number 1: 13-RT0603FRE0730KLCT-ND; Category: RESISTOR; Sub-Category: CHIP RESISTOR; Stock ID: ??; Mount: SMD; Price 10K: 0.0025; Local Supplier: GENERAL
footprint R0603
pins: 1, 2

## TNPW080510K7BEEA
designator R?, comment 10K7
10.7K, %0.1, 1/8W, 0805; Manufacturer: VISHAY; Manufacturer Part Number: TNPW080510K7BEEA; Tolerance: 0.1%; Value: 10700; Power Rating: 125mW; Voltage Rating: 150V; Temperature Coefficient: 25ppm/°C; Voltage Rating (DC): 75V; Purpose Of Usage: BASIC; Supplier 1: Digi-Key; Supplier Part Number 1: 541-3728-1-ND; RoHS: YES; Case/Package: 0805; Case Code (Imperial): 0805; Min Operating Temperature: -55°C; Max Operating Temperature: 125°C; Max Power Dissipation: 125mW; Category: RESISTOR; Sub-Category: CHIP RESISTOR; Stock ID: ??; Mount: SMD; Price 10K: 0.0025; Local Supplier: GENERAL
footprint R0805 (Chip Resistor, 2-Leads, Body 2.00x1.25mm, IPC Medium Density)
pins: 1, 2

## VMS-R050-1.0-U
designator R?, comment 50mR
50mR, %01, 4W, 2512; Manufacturer: Isabellenhütte; Manufacturer Part Number: VMS-R050-1.0-U; Purpose Of Usage: BASIC; Temperature Coefficient: 20ppm/°C; Tolerance: 1%; Value: 0.005; RoHS: No; Category: RESISTOR; Case/Package: 2512; Case Code (Imperial): 2512; Max Operating Temperature: 125°C; Max Power Dissipation: 4w; Min Operating Temperature: -55°C; Mount: SMD; Power Rating: 4W; Stock ID: ??; Sub-Category: CHIP RESISTOR; Supplier 1: Digi-Key; Supplier Part Number 1: 4423-VMS-R050-1.0-UTR-ND
footprint R2512
pins: 1, 2